# Altium integrated library WE-TIS_1111.IntLib: 1 symbol
Pins are listed as number, name and electrical type; pins without a type are passive.

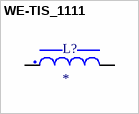
[diagram p0: symbol WE-TIS_1111]

## WE-TIS_1111
designator L?
FIXED IND 1MH 600MA 1.5 OHM TH; MF: WÃ¼rth Elektronik; MP: 7447471102; SnapEDA_Link: https://www.snapeda.com/parts/7447471102/W%25C3%25BCrth+Elektronik+Midcom/view-part/?ref=snap; Package: Radial Wurth Electronics; Value: *; Check_prices: https://www.snapeda.com/parts/7447471102/W%25C3%25BCrth+Elektronik+Midcom/view-part/?ref=eda
footprint WE-TIS_1111
pins: 1, 2